# Altium footprint library WR-TBL_Pluggable Connector_3.81mm.PcbLib: 201 footprints (part 4 of 13)
Each footprint in its own frame and in the unit in brackets; x right, y up, seen from the top. Pads: shape width x height; smd on the part's side, far side on the other; paste and mask are expansions set on the pad; w line width, h text height; cw(c..) or ccw(c..) is an arc to the next point about the centre after c.
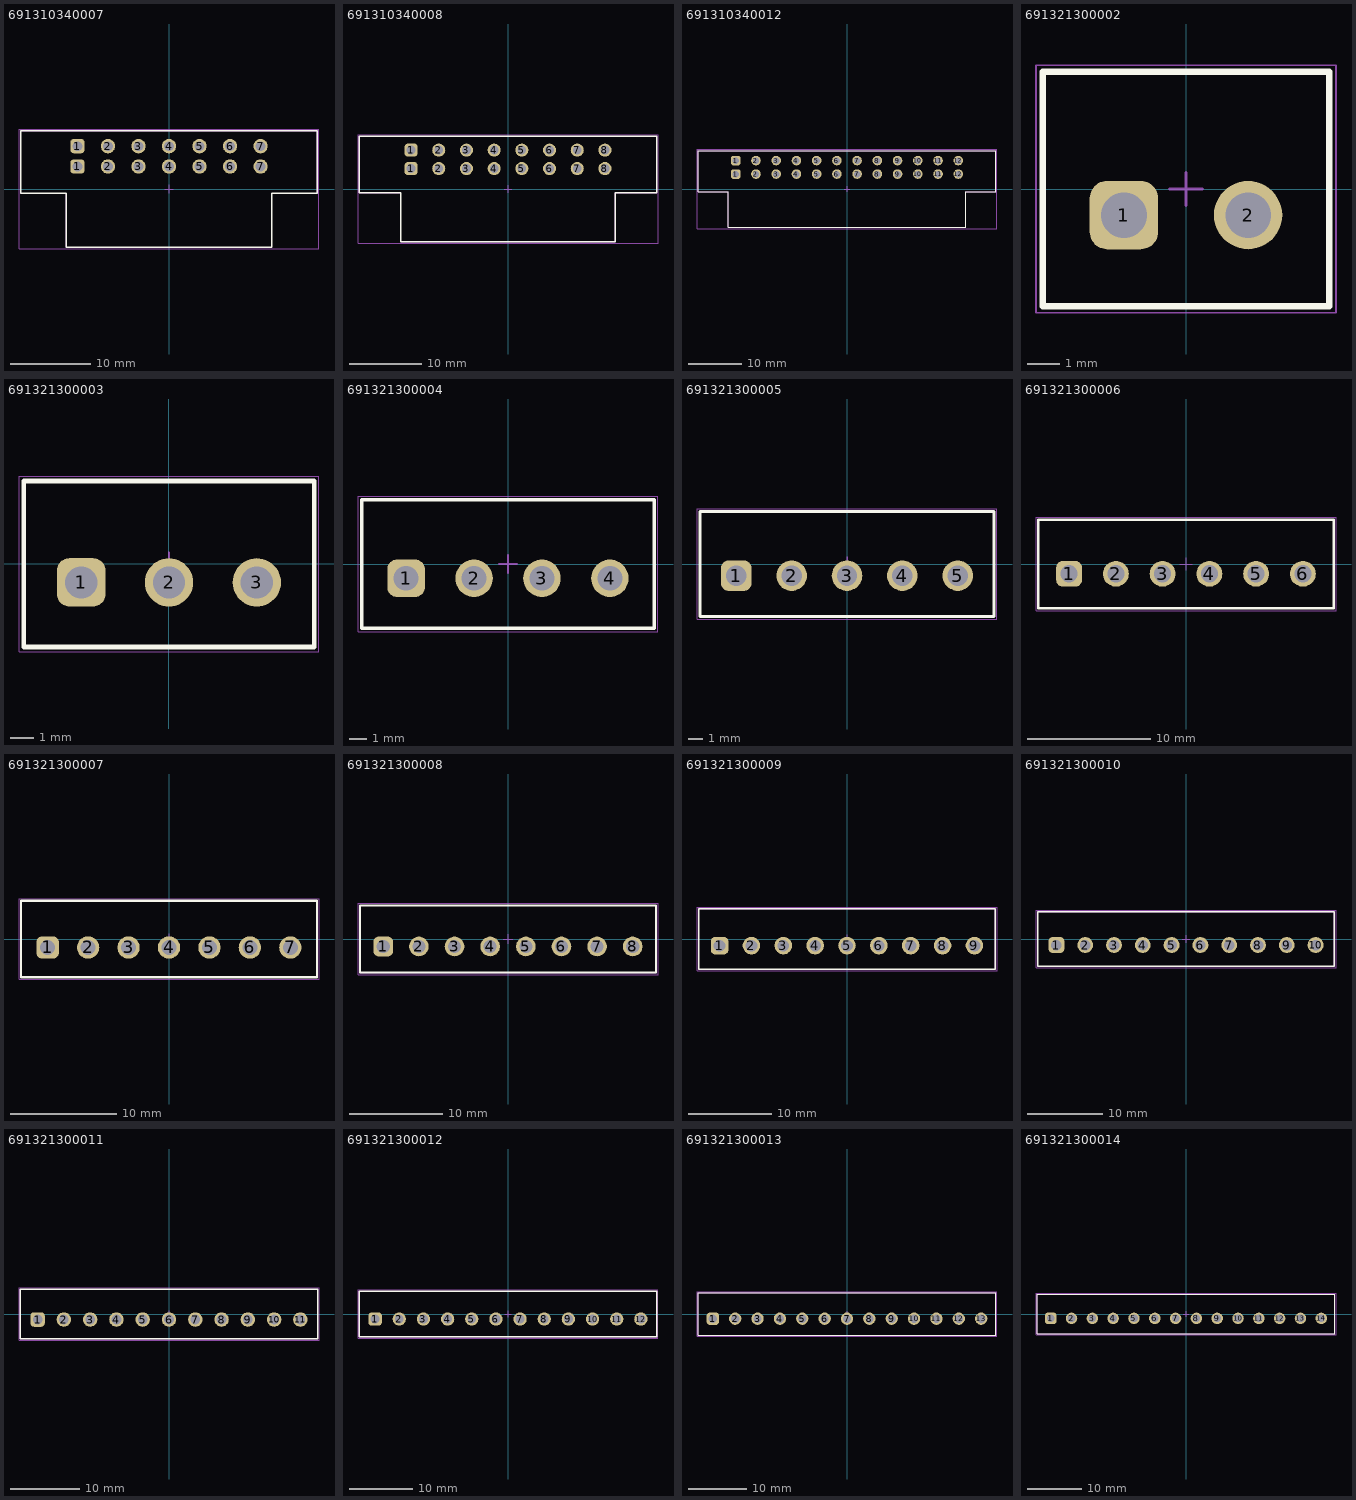
[diagram p3: the footprints below, top view; thin cyan lines are the x and y axes]

## 691310340007 [mm] "Horizontal Reversed PCB Header with Flanges, pitch 3.81mm, 07p"
height 6.8
pads (14):
  rrect50% 1.8x1.8 hole 1.2: 1(-11.43,2.81) 1(-11.43,5.35)
  round 1.8 hole 1.2: 2(-7.62,2.81) 2(-7.62,5.35) 3(-3.81,2.81) 3(-3.81,5.35) 4(0,2.81) 4(0,5.35) 5(3.81,2.81) 5(3.81,5.35) 6(7.62,2.81) 6(7.62,5.35) 7(11.43,2.81) 7(11.43,5.35)
Top Overlay:
  lines w0.2: -18.53,-0.55 -12.83,-0.55 -12.83,-7.25 12.83,-7.25 12.83,-0.55 18.53,-0.55 18.53,7.25 -18.53,7.25 -18.53,-0.55
Top Assembly:
  lines w0.1: -18.53,-0.55 -18.53,7.25 18.53,7.25 18.53,-0.55 12.83,-0.55 12.83,-7.25 -12.83,-7.25 -12.83,-0.55 -18.53,-0.55
Top Designator:
  text ".Designator" at -3.647,-0.357 h1
Top 3D Body:
  lines w0.1: -18.53,-0.55 -12.83,-0.55 -12.83,-7.25 12.83,-7.25 12.83,-0.55 18.53,-0.55 18.53,7.25 -18.53,7.25 -18.53,-0.55
Top Courtyard:
  lines w0.05: -18.73,-7.45 18.73,-7.45 18.73,7.45 -18.73,7.45 -18.73,-7.45
Top Component Center:
  lines w0.1: -0.5,0 0.5,0 ; 0,-0.5 0,0.5
3D body "691310340007.stp": height 6.85, standoff -3.35, extent -18.53,-7.25 18.53,7.25

## 691310340008 [mm] "Horizontal Reversed PCB Header with Flanges, pitch 3.81mm, 08p"
height 6.8
pads (16):
  rrect50% 1.8x1.8 hole 1.2: 1(-13.335,2.81) 1(-13.335,5.35)
  round 1.8 hole 1.2: 2(-9.525,2.81) 2(-9.525,5.35) 3(-5.715,2.81) 3(-5.715,5.35) 4(-1.905,2.81) 4(-1.905,5.35) 5(1.905,2.81) 5(1.905,5.35) 6(5.715,2.81) 6(5.715,5.35) 7(9.525,2.81) 7(9.525,5.35) 8(13.335,2.81) 8(13.335,5.35)
Top Overlay:
  lines w0.2: -20.435,-0.55 -14.735,-0.55 -14.735,-7.25 14.735,-7.25 14.735,-0.55 20.435,-0.55 20.435,7.25 -20.435,7.25 -20.435,-0.55
Top Assembly:
  lines w0.1: -20.435,-0.55 -20.435,7.25 20.435,7.25 20.435,-0.55 14.735,-0.55 14.735,-7.25 -14.735,-7.25 -14.735,-0.55 -20.435,-0.55
Top Designator:
  text ".Designator" at -3.647,-0.357 h1
Top 3D Body:
  lines w0.1: -20.435,-0.55 -14.735,-0.55 -14.735,-7.25 14.735,-7.25 14.735,-0.55 20.435,-0.55 20.435,7.25 -20.435,7.25 -20.435,-0.55
Top Courtyard:
  lines w0.05: -20.635,-7.45 20.635,-7.45 20.635,7.45 -20.635,7.45 -20.635,-7.45
Top Component Center:
  lines w0.1: -0.5,0 0.5,0 ; 0,-0.5 0,0.5
3D body "691310340008.stp": height 6.85, standoff -3.35, extent -20.435,-7.25 20.435,7.25

## 691310340012 [mm] "Horizontal Reversed PCB Header with Flanges, pitch 3.81mm, 12p"
height 6.8
pads (24):
  rrect50% 1.8x1.8 hole 1.2: 1(-20.955,2.81) 1(-20.955,5.35)
  round 1.8 hole 1.2: 2(-17.145,2.81) 2(-17.145,5.35) 3(-13.335,2.81) 3(-13.335,5.35) 4(-9.525,2.81) 4(-9.525,5.35) 5(-5.715,2.81) 5(-5.715,5.35) 6(-1.905,2.81) 6(-1.905,5.35) 7(1.905,2.81) 7(1.905,5.35) 8(5.715,2.81) 8(5.715,5.35) 9(9.525,2.81) 9(9.525,5.35) 10(13.335,2.81) 10(13.335,5.35) 11(17.145,2.81) 11(17.145,5.35) 12(20.955,2.81) 12(20.955,5.35)
Top Overlay:
  lines w0.2: -28.055,-0.55 -22.355,-0.55 -22.355,-7.25 22.355,-7.25 22.355,-0.55 28.055,-0.55 28.055,7.25 -28.055,7.25 -28.055,-0.55
Top Assembly:
  lines w0.1: -28.055,-0.55 -28.055,7.25 28.055,7.25 28.055,-0.55 22.355,-0.55 22.355,-7.25 -22.355,-7.25 -22.355,-0.55 -28.055,-0.55
Top Designator:
  text ".Designator" at -3.647,-0.357 h1
Top 3D Body:
  lines w0.1: -28.055,-0.55 -22.355,-0.55 -22.355,-7.25 22.355,-7.25 22.355,-0.55 28.055,-0.55 28.055,7.25 -28.055,7.25 -28.055,-0.55
Top Courtyard:
  lines w0.05: -28.255,-7.45 28.255,-7.45 28.255,7.45 -28.255,7.45 -28.255,-7.45
Top Component Center:
  lines w0.1: -0.5,0 0.5,0 ; 0,-0.5 0,0.5
3D body "691310340012.stp": height 6.85, standoff -3.35, extent -28.055,-7.25 28.055,7.25

## 691321300002 [mm] "Vertical PCB Header, pitch 3.81mm, 02p"
height 9.2
pads (2):
  rrect50% 2.1x2.1 hole 1.4: 1(-1.905,-0.8)
  round 2.1 hole 1.4: 2(1.905,-0.8)
Top Overlay:
  lines w0.2: -4.405,-3.6 4.405,-3.6 4.405,3.6 -4.405,3.6 -4.405,-3.6
Top Assembly:
  lines w0.1: -4.405,-3.6 -4.405,3.6 4.405,3.6 4.405,-3.6 -4.405,-3.6
Top Designator:
  text ".Designator" at -3.647,-0.357 h1
Top 3D Body:
  lines w0.1: -4.405,-3.6 4.405,-3.6 4.405,3.6 -4.405,3.6 -4.405,-3.6
Top Courtyard:
  lines w0.05: -4.605,-3.8 -4.605,3.8 4.605,3.8 4.605,-3.8 -4.605,-3.8
Top Component Center:
  lines w0.1: -0.5,0 0.5,0 ; 0,-0.5 0,0.5
3D body "691321300002.stp": height 9.25, standoff -3.45, extent -4.405,-3.6 4.405,3.6

## 691321300003 [mm] "Vertical PCB Header, pitch 3.81mm, 03p"
height 9.2
pads (3):
  rrect50% 2.1x2.1 hole 1.4: 1(-3.81,-0.8)
  round 2.1 hole 1.4: 2(0,-0.8) 3(3.81,-0.8)
Top Overlay:
  lines w0.2: -6.31,-3.6 -6.31,3.6 6.31,3.6 6.31,-3.6 -6.31,-3.6
Top Assembly:
  lines w0.1: -6.31,-3.6 6.31,-3.6 6.31,3.6 -6.31,3.6 -6.31,-3.6
Top Designator:
  text ".Designator" at -3.647,-0.357 h1
Top 3D Body:
  lines w0.1: -6.31,-3.6 -6.31,3.6 6.31,3.6 6.31,-3.6 -6.31,-3.6
Top Courtyard:
  lines w0.05: -6.51,-3.8 6.51,-3.8 6.51,3.8 -6.51,3.8 -6.51,-3.8
Top Component Center:
  lines w0.1: -0.5,0 0.5,0 ; 0,-0.5 0,0.5
3D body "691321300003.stp": height 9.25, standoff -3.45, extent -6.31,-3.6 6.31,3.6

## 691321300004 [mm] "Vertical PCB Header, pitch 3.81mm, 04p"
height 9.2
pads (4):
  rrect50% 2.1x2.1 hole 1.4: 1(-5.715,-0.8)
  round 2.1 hole 1.4: 2(-1.905,-0.8) 3(1.905,-0.8) 4(5.715,-0.8)
Top Overlay:
  lines w0.2: -8.215,-3.6 -8.215,3.6 8.215,3.6 8.215,-3.6 -8.215,-3.6
Top Assembly:
  lines w0.1: -8.215,-3.6 8.215,-3.6 8.215,3.6 -8.215,3.6 -8.215,-3.6
Top Designator:
  text ".Designator" at -3.647,-0.357 h1
Top 3D Body:
  lines w0.1: -8.215,-3.6 -8.215,3.6 8.215,3.6 8.215,-3.6 -8.215,-3.6
Top Courtyard:
  lines w0.05: -8.415,-3.8 8.415,-3.8 8.415,3.8 -8.415,3.8 -8.415,-3.8
Top Component Center:
  lines w0.1: -0.5,0 0.5,0 ; 0,-0.5 0,0.5
3D body "691321300004.stp": height 9.25, standoff -3.45, extent -8.215,-3.6 8.215,3.6

## 691321300005 [mm] "Vertical PCB Header, pitch 3.81mm, 05p"
height 9.2
pads (5):
  rrect50% 2.1x2.1 hole 1.4: 1(-7.62,-0.8)
  round 2.1 hole 1.4: 2(-3.81,-0.8) 3(0,-0.8) 4(3.81,-0.8) 5(7.62,-0.8)
Top Overlay:
  lines w0.2: -10.12,-3.6 -10.12,3.6 10.12,3.6 10.12,-3.6 -10.12,-3.6
Top Assembly:
  lines w0.1: -10.12,-3.6 10.12,-3.6 10.12,3.6 -10.12,3.6 -10.12,-3.6
Top Designator:
  text ".Designator" at -3.647,-0.357 h1
Top 3D Body:
  lines w0.1: -10.12,-3.6 -10.12,3.6 10.12,3.6 10.12,-3.6 -10.12,-3.6
Top Courtyard:
  lines w0.05: -10.32,-3.8 10.32,-3.8 10.32,3.8 -10.32,3.8 -10.32,-3.8
Top Component Center:
  lines w0.1: -0.5,0 0.5,0 ; 0,-0.5 0,0.5
3D body "691321300005.stp": height 9.25, standoff -3.45, extent -10.12,-3.6 10.12,3.6

## 691321300006 [mm] "Vertical PCB Header, pitch 3.81mm, 06p"
height 9.2
pads (6):
  rrect50% 2.1x2.1 hole 1.4: 1(-9.525,-0.8)
  round 2.1 hole 1.4: 2(-5.715,-0.8) 3(-1.905,-0.8) 4(1.905,-0.8) 5(5.715,-0.8) 6(9.525,-0.8)
Top Overlay:
  lines w0.2: -12.025,-3.6 12.025,-3.6 12.025,3.6 -12.025,3.6 -12.025,-3.6
Top Assembly:
  lines w0.1: -12.025,-3.6 -12.025,3.6 12.025,3.6 12.025,-3.6 -12.025,-3.6
Top Designator:
  text ".Designator" at -3.647,-0.357 h1
Top 3D Body:
  lines w0.1: -12.025,-3.6 12.025,-3.6 12.025,3.6 -12.025,3.6 -12.025,-3.6
Top Courtyard:
  lines w0.05: -12.225,-3.8 -12.225,3.8 12.225,3.8 12.225,-3.8 -12.225,-3.8
Top Component Center:
  lines w0.1: -0.5,0 0.5,0 ; 0,-0.5 0,0.5
3D body "691321300006.stp": height 9.25, standoff -3.45, extent -12.025,-3.6 12.025,3.6

## 691321300007 [mm] "Vertical PCB Header, pitch 3.81mm, 07p"
height 9.2
pads (7):
  rrect50% 2.1x2.1 hole 1.4: 1(-11.43,-0.8)
  round 2.1 hole 1.4: 2(-7.62,-0.8) 3(-3.81,-0.8) 4(0,-0.8) 5(3.81,-0.8) 6(7.62,-0.8) 7(11.43,-0.8)
Top Overlay:
  lines w0.2: -13.93,-3.6 -13.93,3.6 13.93,3.6 13.93,-3.6 -13.93,-3.6
Top Assembly:
  lines w0.1: -13.93,-3.6 13.93,-3.6 13.93,3.6 -13.93,3.6 -13.93,-3.6
Top Designator:
  text ".Designator" at -3.647,-0.357 h1
Top 3D Body:
  lines w0.1: -13.93,-3.6 -13.93,3.6 13.93,3.6 13.93,-3.6 -13.93,-3.6
Top Courtyard:
  lines w0.05: -14.13,-3.8 14.13,-3.8 14.13,3.8 -14.13,3.8 -14.13,-3.8
Top Component Center:
  lines w0.1: -0.5,0 0.5,0 ; 0,-0.5 0,0.5
3D body "691321300007.stp": height 9.25, standoff -3.45, extent -13.93,-3.6 13.93,3.6

## 691321300008 [mm] "Vertical PCB Header, pitch 3.81mm, 08p"
height 9.2
pads (8):
  rrect50% 2.1x2.1 hole 1.4: 1(-13.335,-0.8)
  round 2.1 hole 1.4: 2(-9.525,-0.8) 3(-5.715,-0.8) 4(-1.905,-0.8) 5(1.905,-0.8) 6(5.715,-0.8) 7(9.525,-0.8) 8(13.335,-0.8)
Top Overlay:
  lines w0.2: -15.835,-3.6 -15.835,3.6 15.835,3.6 15.835,-3.6 -15.835,-3.6
Top Assembly:
  lines w0.1: -15.835,-3.6 15.835,-3.6 15.835,3.6 -15.835,3.6 -15.835,-3.6
Top Designator:
  text ".Designator" at -3.647,-0.357 h1
Top 3D Body:
  lines w0.1: -15.835,-3.6 -15.835,3.6 15.835,3.6 15.835,-3.6 -15.835,-3.6
Top Courtyard:
  lines w0.05: -16.035,-3.8 16.035,-3.8 16.035,3.8 -16.035,3.8 -16.035,-3.8
Top Component Center:
  lines w0.1: -0.5,0 0.5,0 ; 0,-0.5 0,0.5
3D body "691321300008.stp": height 9.25, standoff -3.45, extent -15.835,-3.6 15.835,3.6

## 691321300009 [mm] "Vertical PCB Header, pitch 3.81mm, 09p"
height 9.2
pads (9):
  rrect50% 2.1x2.1 hole 1.4: 1(-15.24,-0.8)
  round 2.1 hole 1.4: 2(-11.43,-0.8) 3(-7.62,-0.8) 4(-3.81,-0.8) 5(0,-0.8) 6(3.81,-0.8) 7(7.62,-0.8) 8(11.43,-0.8) 9(15.24,-0.8)
Top Overlay:
  lines w0.2: -17.74,-3.6 17.74,-3.6 17.74,3.6 -17.74,3.6 -17.74,-3.6
Top Assembly:
  lines w0.1: -17.74,-3.6 -17.74,3.6 17.74,3.6 17.74,-3.6 -17.74,-3.6
Top Designator:
  text ".Designator" at -3.647,-0.357 h1
Top 3D Body:
  lines w0.1: -17.74,-3.6 17.74,-3.6 17.74,3.6 -17.74,3.6 -17.74,-3.6
Top Courtyard:
  lines w0.05: -17.94,-3.8 -17.94,3.8 17.94,3.8 17.94,-3.8 -17.94,-3.8
Top Component Center:
  lines w0.1: -0.5,0 0.5,0 ; 0,-0.5 0,0.5
3D body "691321300009.stp": height 9.25, standoff -3.45, extent -17.74,-3.6 17.74,3.6

## 691321300010 [mm] "Vertical PCB Header, pitch 3.81mm, 10p"
height 9.2
pads (10):
  rrect50% 2.1x2.1 hole 1.4: 1(-17.145,-0.8)
  round 2.1 hole 1.4: 2(-13.335,-0.8) 3(-9.525,-0.8) 4(-5.715,-0.8) 5(-1.905,-0.8) 6(1.905,-0.8) 7(5.715,-0.8) 8(9.525,-0.8) 9(13.335,-0.8) 10(17.145,-0.8)
Top Overlay:
  lines w0.2: -19.645,-3.6 19.645,-3.6 19.645,3.6 -19.645,3.6 -19.645,-3.6
Top Assembly:
  lines w0.1: -19.645,-3.6 -19.645,3.6 19.645,3.6 19.645,-3.6 -19.645,-3.6
Top Designator:
  text ".Designator" at -3.647,-0.357 h1
Top 3D Body:
  lines w0.1: -19.645,-3.6 19.645,-3.6 19.645,3.6 -19.645,3.6 -19.645,-3.6
Top Courtyard:
  lines w0.05: -19.845,-3.8 -19.845,3.8 19.845,3.8 19.845,-3.8 -19.845,-3.8
Top Component Center:
  lines w0.1: -0.5,0 0.5,0 ; 0,-0.5 0,0.5
3D body "691321300010.stp": height 9.25, standoff -3.45, extent -19.645,-3.6 19.645,3.6

## 691321300011 [mm] "Vertical PCB Header, pitch 3.81mm, 11p"
height 9.2
pads (11):
  rrect50% 2.1x2.1 hole 1.4: 1(-19.05,-0.8)
  round 2.1 hole 1.4: 2(-15.24,-0.8) 3(-11.43,-0.8) 4(-7.62,-0.8) 5(-3.81,-0.8) 6(0,-0.8) 7(3.81,-0.8) 8(7.62,-0.8) 9(11.43,-0.8) 10(15.24,-0.8) 11(19.05,-0.8)
Top Overlay:
  lines w0.2: -21.55,-3.6 -21.55,3.6 21.55,3.6 21.55,-3.6 -21.55,-3.6
Top Assembly:
  lines w0.1: -21.55,-3.6 21.55,-3.6 21.55,3.6 -21.55,3.6 -21.55,-3.6
Top Designator:
  text ".Designator" at -3.647,-0.357 h1
Top 3D Body:
  lines w0.1: -21.55,-3.6 -21.55,3.6 21.55,3.6 21.55,-3.6 -21.55,-3.6
Top Courtyard:
  lines w0.05: -21.75,-3.8 21.75,-3.8 21.75,3.8 -21.75,3.8 -21.75,-3.8
Top Component Center:
  lines w0.1: -0.5,0 0.5,0 ; 0,-0.5 0,0.5
3D body "691321300011.stp": height 9.25, standoff -3.45, extent -21.55,-3.6 21.55,3.6

## 691321300012 [mm] "Vertical PCB Header, pitch 3.81mm, 12p"
height 9.2
pads (12):
  rrect50% 2.1x2.1 hole 1.4: 1(-20.955,-0.8)
  round 2.1 hole 1.4: 2(-17.145,-0.8) 3(-13.335,-0.8) 4(-9.525,-0.8) 5(-5.715,-0.8) 6(-1.905,-0.8) 7(1.905,-0.8) 8(5.715,-0.8) 9(9.525,-0.8) 10(13.335,-0.8) 11(17.145,-0.8) 12(20.955,-0.8)
Top Overlay:
  lines w0.2: -23.455,-3.6 23.455,-3.6 23.455,3.6 -23.455,3.6 -23.455,-3.6
Top Assembly:
  lines w0.1: -23.455,-3.6 -23.455,3.6 23.455,3.6 23.455,-3.6 -23.455,-3.6
Top Designator:
  text ".Designator" at -3.647,-0.357 h1
Top 3D Body:
  lines w0.1: -23.455,-3.6 23.455,-3.6 23.455,3.6 -23.455,3.6 -23.455,-3.6
Top Courtyard:
  lines w0.05: -23.655,-3.8 -23.655,3.8 23.655,3.8 23.655,-3.8 -23.655,-3.8
Top Component Center:
  lines w0.1: -0.5,0 0.5,0 ; 0,-0.5 0,0.5
3D body "691321300012.stp": height 9.25, standoff -3.45, extent -23.455,-3.6 23.455,3.6

## 691321300013 [mm] "Vertical PCB Header, pitch 3.81mm, 13p"
height 9.2
pads (13):
  rrect50% 2.1x2.1 hole 1.4: 1(-22.86,-0.8)
  round 2.1 hole 1.4: 2(-19.05,-0.8) 3(-15.24,-0.8) 4(-11.43,-0.8) 5(-7.62,-0.8) 6(-3.81,-0.8) 7(0,-0.8) 8(3.81,-0.8) 9(7.62,-0.8) 10(11.43,-0.8) 11(15.24,-0.8) 12(19.05,-0.8) 13(22.86,-0.8)
Top Overlay:
  lines w0.2: -25.36,-3.6 25.36,-3.6 25.36,3.6 -25.36,3.6 -25.36,-3.6
Top Assembly:
  lines w0.1: -25.36,-3.6 -25.36,3.6 25.36,3.6 25.36,-3.6 -25.36,-3.6
Top Designator:
  text ".Designator" at -3.647,-0.357 h1
Top 3D Body:
  lines w0.1: -25.36,-3.6 25.36,-3.6 25.36,3.6 -25.36,3.6 -25.36,-3.6
Top Courtyard:
  lines w0.05: -25.56,-3.8 -25.56,3.8 25.56,3.8 25.56,-3.8 -25.56,-3.8
Top Component Center:
  lines w0.1: -0.5,0 0.5,0 ; 0,-0.5 0,0.5
3D body "691321300013.stp": height 9.25, standoff -3.45, extent -25.36,-3.6 25.36,3.6

## 691321300014 [mm] "Vertical PCB Header, pitch 3.81mm, 14p"
height 9.2
pads (14):
  rrect50% 2.1x2.1 hole 1.4: 1(-24.765,-0.8)
  round 2.1 hole 1.4: 2(-20.955,-0.8) 3(-17.145,-0.8) 4(-13.335,-0.8) 5(-9.525,-0.8) 6(-5.715,-0.8) 7(-1.905,-0.8) 8(1.905,-0.8) 9(5.715,-0.8) 10(9.525,-0.8) 11(13.335,-0.8) 12(17.145,-0.8) 13(20.955,-0.8) 14(24.765,-0.8)
Top Overlay:
  lines w0.2: -27.265,-3.6 27.265,-3.6 27.265,3.6 -27.265,3.6 -27.265,-3.6
Top Assembly:
  lines w0.1: -27.265,-3.6 -27.265,3.6 27.265,3.6 27.265,-3.6 -27.265,-3.6
Top Designator:
  text ".Designator" at -3.647,-0.357 h1
Top 3D Body:
  lines w0.1: -27.265,-3.6 27.265,-3.6 27.265,3.6 -27.265,3.6 -27.265,-3.6
Top Courtyard:
  lines w0.05: -27.465,-3.8 -27.465,3.8 27.465,3.8 27.465,-3.8 -27.465,-3.8
Top Component Center:
  lines w0.1: -0.5,0 0.5,0 ; 0,-0.5 0,0.5
3D body "691321300014.stp": height 9.25, standoff -3.45, extent -27.265,-3.6 27.265,3.6